# Altium footprint library Connectors.PcbLib: 304 footprints (part 13 of 19)
Each footprint in its own frame and in the unit in brackets; x right, y up, seen from the top. Pads: shape width x height; smd on the part's side, far side on the other; paste and mask are expansions set on the pad; w line width, h text height; cw(c..) or ccw(c..) is an arc to the next point about the centre after c.
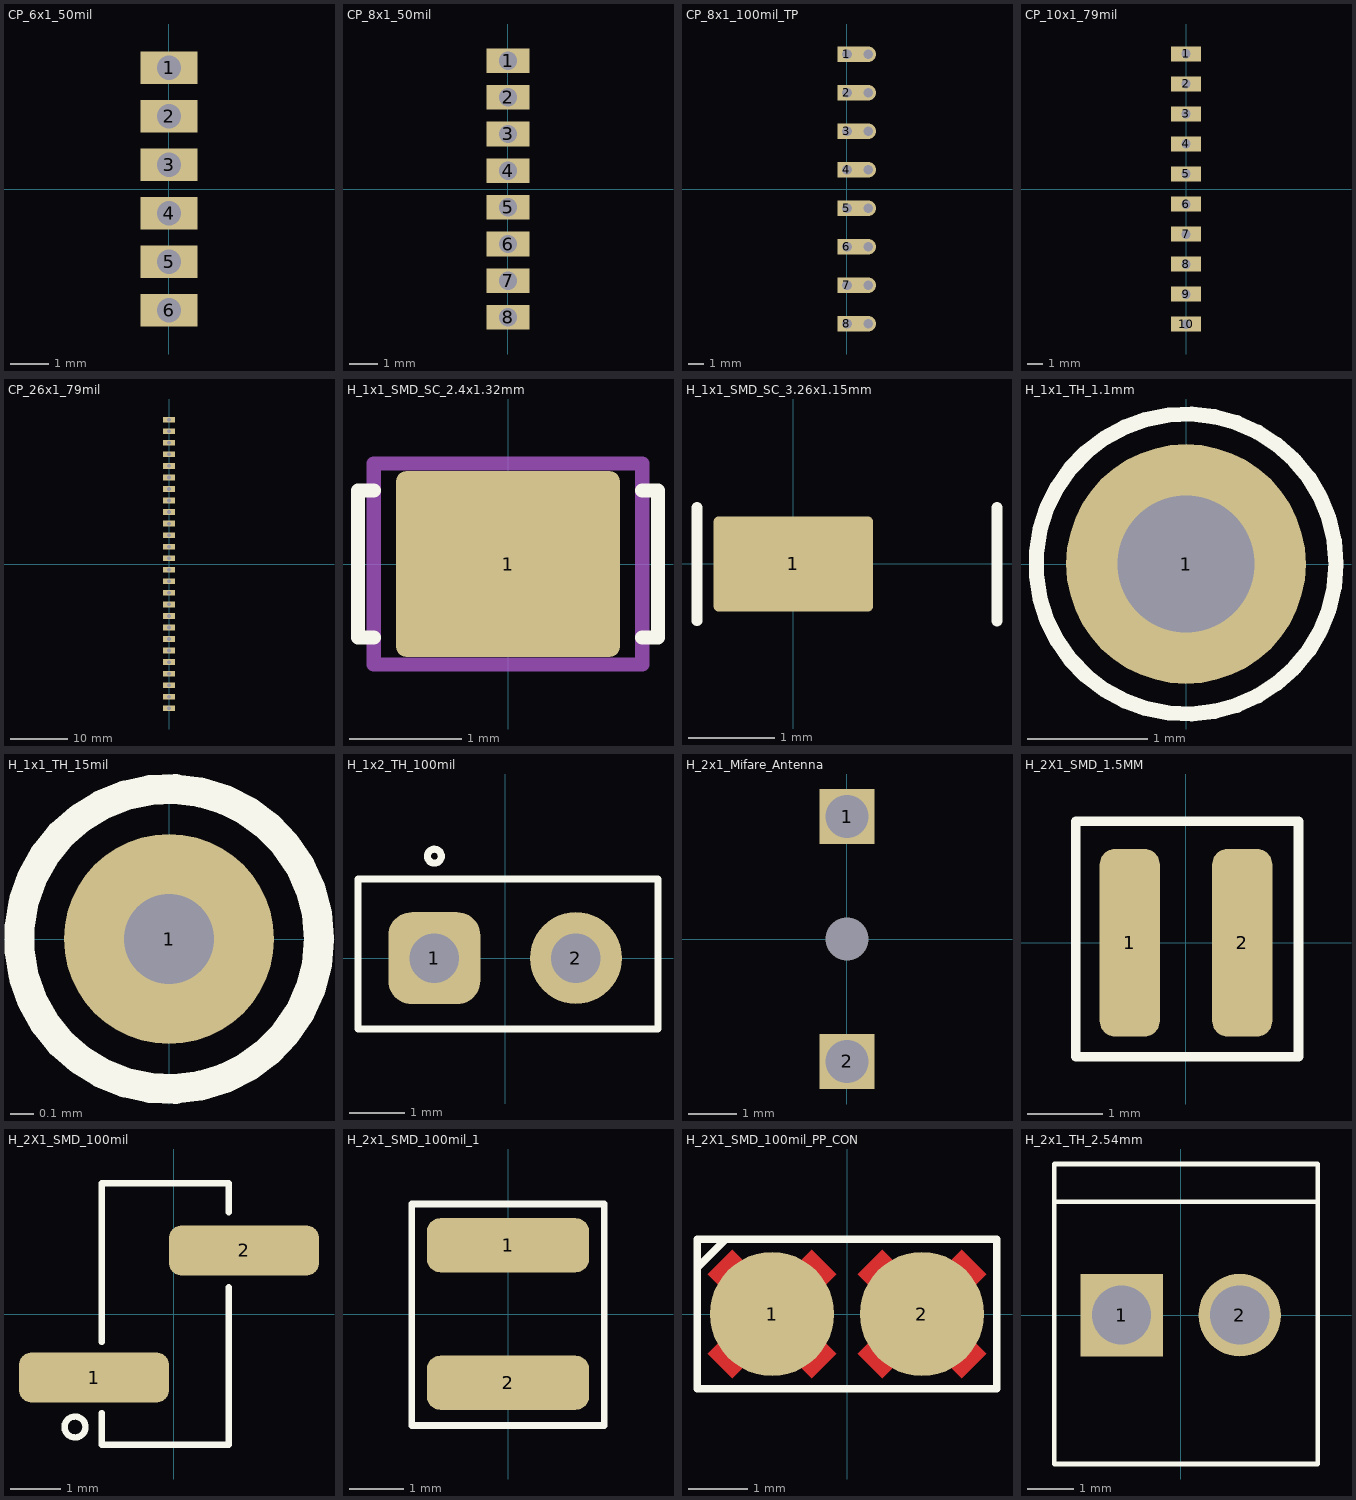
[diagram p12: the footprints below, top view; thin cyan lines are the x and y axes]

## CP_6x1_50mil [mm] "/ 20220331 N-A.Potosi"
pads (6):
  rect 1.5x0.85 hole 0.635 paste-0.254: 1(0,3.175) 2(0,1.905) 3(0,0.635) 4(0,-0.635) 5(0,-1.905) 6(0,-3.175)

## CP_8x1_50mil [mm] "/ 20200103 C-A.Serna.A"
pads (8):
  rect 1.5x0.85 hole 0.635 paste-0.254: 1(0,4.445) 2(0,3.175) 3(0,1.905) 4(0,0.635) 5(0,-0.635) 6(0,-1.905) 7(0,-3.175) 8(0,-4.445)

## CP_8x1_100mil_TP [mil] "/ 20200103 C-A.Serna.A"
pads (8):
  rect 80x40 hole 25 copper offset 15,0 paste-10: 1(0,350) 3(0,150) 4(0,50) 5(0,-50) 6(0,-150) 7(0,-250) 8(0,-350)
  rect 80x40 hole 25 copper offset 15,0 paste-20: 2(0,250)
via 55,350 diameter 40 hole 25
via 55,250 diameter 40 hole 25
via 55,150 diameter 40 hole 25
via 55,50 diameter 40 hole 25
via 55,-50 diameter 40 hole 25
via 55,-150 diameter 40 hole 25
via 55,-250 diameter 40 hole 25
via 55,-350 diameter 40 hole 25

## CP_10x1_79mil [mm] "/20230808/J-A.Sepulveda"
pads (10):
  rect 2x1 hole 0.635 paste-0.254: 1(0,9.03) 2(0,7.023) 3(0,5.016) 4(0,3.01) 5(0,1.003) 6(0,-1.003) 7(0,-3.01) 8(0,-5.016) 9(0,-7.023) 10(0,-9.03)

## CP_26x1_79mil [mm] "/20230808/J-A.Sepulveda"
pads (26):
  rect 2x1 hole 0.635 paste-0.254: 1(0,25.082) 2(0,23.076) 3(0,21.069) 4(0,19.063) 5(0,17.056) 6(0,15.05) 7(0,13.043) 8(0,11.036) 9(0,9.03) 10(0,7.023) 11(0,5.016) 12(0,3.01) 13(0,1.003) 14(0,-1.003) 15(0,-3.01) 16(0,-5.016) 17(0,-7.023) 18(0,-9.03) 19(0,-11.036) 20(0,-13.043) 21(0,-15.05) 22(0,-17.056) 23(0,-19.063) 24(0,-21.069) 25(0,-23.076) 26(0,-25.082)

## H_1x1_SMD_SC_2.4x1.32mm [mm] "/ 20190522 / H-D.Garcia"
pads (1):
  rrect10% 2x1.66 smd paste-10: 1(0,0)
Top Overlay:
  lines w0.127: -1.2,-0.658 -1.341,-0.658 -1.341,0.658 -1.2,0.658 ; 1.2,-0.658 1.341,-0.658 1.341,0.658 1.2,0.658
Top Paste:
  rectangle: -0.25,0.18 0.95,0.78
  region: -0.45,0.78 -0.95,0.78 -0.95,0.18 -0.45,0.18
  region: -0.45,-0.18 -0.95,-0.18 -0.95,-0.78 -0.45,-0.78
  rectangle: -0.25,-0.78 0.95,-0.18
Mechanical 15:
  lines w0.127: -0.25,0 0.25,0 ; 0,-0.25 0,0.25 ; -1.2,-0.9 -1.2,0.9 1.2,0.9 1.2,-0.9 -1.2,-0.9
3D body "1054390005.stp": height 2.5, standoff -0.38, extent -1.441,-0.658 1.441,0.658

## H_1x1_SMD_SC_3.26x1.15mm [mm] "/ 20211111/ N-A.Potosi"
pads (1):
  rrect10% 1.85x1.1 smd paste-10: 1(0,0)
Top Overlay:
  lines w0.127: -1.118,-0.658 -1.118,0.658 ; 2.362,-0.66 2.362,0.656
3D body "c-1551576-5-a-3d.stp": height 3.41, standoff 0.01, extent -0.869,-0.704 2.391,0.696

## H_1x1_TH_1.1mm [mm] "/ 20210323/ N-A.Potosi"
pads (1):
  round 2 hole 1.143: 1(0,0)
Top Overlay:
  circle w0.127: c0,0 r1.252

## H_1x1_TH_15mil [mil] "/ 20190222 / C-A.Serna.A"
pads (1):
  round 35 hole 15: 1(0,0)
Top Overlay:
  circle w5: c0,0 r25
Bottom Overlay:
  circle w5: c0,0 r25

## H_1x2_TH_100mil [mil] "/ 20220725/ F-A.Ospina"
pads (2):
  rrect50% 65x65 hole 35: 1(-50,0)
  round 65 hole 35: 2(50,0)
Top Overlay:
  circle w5: c-50,72 r4.92
  lines w5: -104,-50 108,-50 108,56 -104,56 -104,-50
3D body "PPTC021LFBN-RC--3DModel-STEP-56544.STEP": height 335.5, standoff -125.5, extent -108.17,-46.85 111.83,53.15

## H_2x1_Mifare_Antenna [mil] "/ 20190920 / M-X.Arias"
pads (3):
  rect 45x45 hole 35: 1(0,100) 2(0,-100)
  round 32 hole 35 unplated paste+0 mask+4: ""(0,0)

## H_2X1_SMD_1.5MM [mm] "/20210114/J-E.Pachon"
pads (2):
  rrect50% 0.8x2.5 smd: 1(-0.75,0) 2(0.75,0)
Top Overlay:
  lines w0.127: -1.47,-1.52 -1.47,1.62 1.5,1.62 1.5,-1.52 -1.47,-1.52

## H_2X1_SMD_100mil [mm] "/ 20221215 / J-A.Sepulveda"
pads (2):
  rrect50% 3x1 smd: 1(-1.6,-1.27) 2(1.4,1.27)
Top Overlay:
  circle w0.127: c-1.98,-2.261 r0.209
  lines w0.127: -1.446,-1.981 -1.446,-2.616 1.094,-2.616 1.094,0.533 ; -1.446,-0.559 -1.446,2.616 1.094,2.616 1.094,2.032
3D body "CONN HEADER SMD 2POS 2.54MM.stp": height 9.66, standoff 0.01, extent -2.5,-2.525 2.3,2.525

## H_2x1_SMD_100mil_1 [mm] "/ 20210701 / J-E.Pachon"
pads (2):
  rrect50% 3x1 smd: 1(0,1.27) 2(0,-1.27)
Top Overlay:
  lines w0.127: -1.778,-2.057 1.778,-2.057 1.778,2.032 -1.778,2.032 -1.778,-2.057

## H_2X1_SMD_100mil_PP_CON [mm] "/ 20190222 / C-A.Serna.A"
pads (2):
  round 2.1 smd mask-0.05: 1(-1.27,0) 2(1.27,0)
Top Layer:
  region: 2.366,0.672 1.942,1.096 0.174,-0.672 0.598,-1.096
  region: 1.942,-1.096 2.366,-0.672 0.598,1.096 0.174,0.672
  region: -0.598,-1.096 -0.174,-0.672 -1.942,1.096 -2.366,0.672
  region: -2.366,-0.672 -1.942,-1.096 -0.174,0.672 -0.598,1.096
Top Overlay:
  lines w0.127: -2.535,0.785 -2.06,1.26 ; -2.54,-1.27 -2.54,1.27 2.54,1.27 2.54,-1.27 -2.54,-1.27

## H_2x1_TH_2.54mm [mil] "/ 20200520 / J-E.Pachon"
pads (2):
  rect 70x70 hole 50: 1(-50,0)
  round 70 hole 50: 2(50,0)
Top Overlay:
  lines w3.94: -107,96 114,96 ; -107,-126 -107,128 116,128 116,-126 -107,-126
3D body "022232021.stp": height 395.5, standoff -164.5, extent -95.12,-127.08 98.88,122.92